# Altium footprint library TIA_LT1793.PcbLib: 8 footprints
Each footprint in its own frame and in the unit in brackets; x right, y up, seen from the top. Pads: shape width x height; smd on the part's side, far side on the other; paste and mask are expansions set on the pad; w line width, h text height; cw(c..) or ccw(c..) is an arc to the next point about the centre after c.
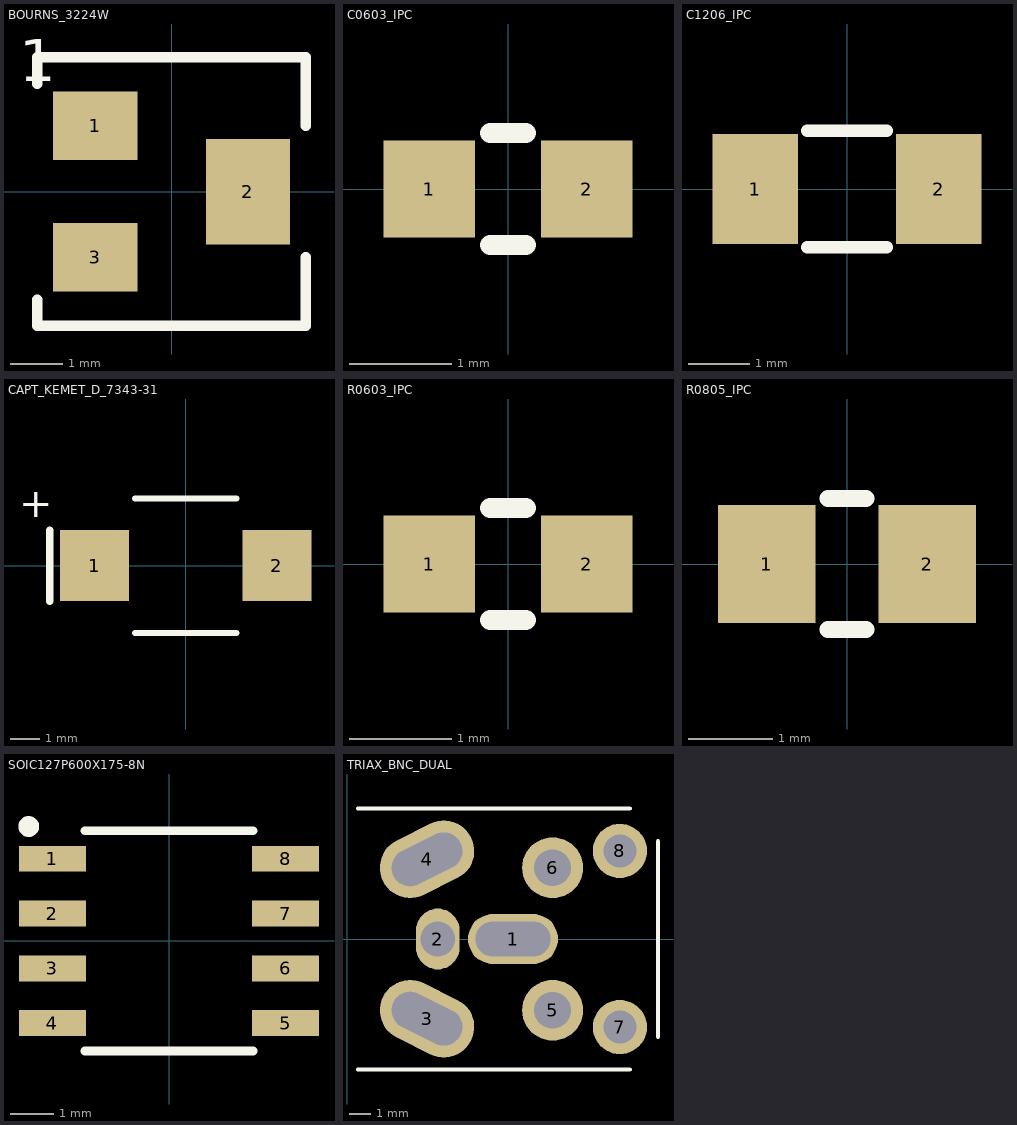
[diagram p0: the footprints below, top view; thin cyan lines are the x and y axes]

## BOURNS_3224W [mm] "Bourns 3224W trimmer 4 mm SMD top adjust. Pads 1/3 (extremos) 1.6x1.3 mm a x=-1.45, y=+-1.25; pad 2 (cursor) 1.6x2.0 mm a x=+1.45"
pads (3):
  rect 1.6x1.3 smd: 1(-1.45,1.25) 3(-1.45,-1.25)
  rect 1.6x2 smd: 2(1.45,0)
Layer0:
  lines w0.05: -2.8,-2.8 2.8,-2.8 2.8,2.8 -2.8,2.8 -2.8,-2.8
Top Overlay:
  lines w0.2: -2.55,-2.05 -2.55,-2.55 -0.45,-2.55 0.45,-2.55 2.55,-2.55 2.55,-1.25 ; -2.55,2.05 -2.55,2.55 -0.45,2.55 0.45,2.55 2.55,2.55 2.55,1.25
  text "1" at -2.9,2.1 h0.8

## C0603_IPC [mm] "Chip 0603 (1608 metric), IPC-7351B nominal: pads 0.90x0.95 mm a +-0.775 mm"
pads (2):
  rect 0.9x0.95 smd: 1(-0.775,0) 2(0.775,0)
Layer0:
  lines w0.05: -1.475,-0.725 1.475,-0.725 1.475,0.725 -1.475,0.725 -1.475,-0.725
Top Overlay:
  lines w0.2: -0.175,-0.55 0.175,-0.55 ; -0.175,0.55 0.175,0.55

## C1206_IPC [mm] "Chip 1206 (3216 metric), IPC-7351B nominal: pads 1.40x1.80 mm a +-1.50 mm"
pads (2):
  rect 1.4x1.8 smd: 1(-1.5,0) 2(1.5,0)
Layer0:
  lines w0.05: -2.45,-1.15 2.45,-1.15 2.45,1.15 -2.45,1.15 -2.45,-1.15
Top Overlay:
  lines w0.2: -0.65,-0.95 0.65,-0.95 ; -0.65,0.95 0.65,0.95

## CAPT_KEMET_D_7343-31 [mm] "KEMET T491 caso D (EIA 7343-31), Table 2 densidad B: pad L2.37 x W2.43 mm, hueco 3.87 mm. Pad 1 = anodo (+)"
pads (2):
  rect 2.37x2.43 smd: 1(-3.12,0) 2(3.12,0)
Layer0:
  lines w0.05: -4.56,-2.55 4.56,-2.55 4.56,2.55 -4.56,2.55 -4.56,-2.55
Top Overlay:
  lines w0.2: -1.735,-2.3 1.735,-2.3 ; -1.735,2.3 1.735,2.3
  lines w0.25: -4.655,-1.215 -4.655,1.215
  text "+" at -5.705,1.665 h1

## R0603_IPC [mm] "Chip 0603 (1608 metric), IPC-7351B nominal: pads 0.90x0.95 mm a +-0.775 mm"
pads (2):
  rect 0.9x0.95 smd: 1(-0.775,0) 2(0.775,0)
Layer0:
  lines w0.05: -1.475,-0.725 1.475,-0.725 1.475,0.725 -1.475,0.725 -1.475,-0.725
Top Overlay:
  lines w0.2: -0.175,-0.55 0.175,-0.55 ; -0.175,0.55 0.175,0.55

## R0805_IPC [mm] "Chip 0805 (2012 metric), IPC-7351B nominal: pads 1.15x1.40 mm a +-0.95 mm"
pads (2):
  rect 1.15x1.4 smd: 1(-0.95,0) 2(0.95,0)
Layer0:
  lines w0.05: -1.775,-0.95 1.775,-0.95 1.775,0.95 -1.775,0.95 -1.775,-0.95
Top Overlay:
  lines w0.2: -0.225,-0.775 0.225,-0.775 ; -0.225,0.775 0.225,0.775

## SOIC127P600X175-8N [mm] "SO-8 (LT1793CS8, ADI/LTC S8), pitch 1.27 mm, filas a +-2.70 mm, pads 1.55x0.60 mm (IPC-7351B nominal). Pin 1 arriba izquierda"
pads (8):
  rect 1.55x0.6 smd: 1(-2.7,1.905) 2(-2.7,0.635) 3(-2.7,-0.635) 4(-2.7,-1.905) 5(2.7,-1.905) 6(2.7,-0.635) 7(2.7,0.635) 8(2.7,1.905)
Top Overlay:
  circle w0.24: c-3.25,2.65 r0.12
  lines w0.2: -1.95,-2.55 1.95,-2.55 ; -1.95,2.55 1.95,2.55

## TRIAX_BNC_DUAL [mm] "Huella doble V3_DUAL: BNC acodado cntitle BNC-KWE-6 (C20415789) o triaxial Trompeter/Cinch CBBJR79. 1=vivo (ranura comun), 2=guard triax, 3-8=carcasa. Origen = borde de placa en el eje; el conector sale hacia -X"
pads (8):
  oval 4.14x2.3 hole 1.6 slot 3.44 at 0 deg: 1(7.63,0)
  oval 2x2.8 hole 1.6: 2(4.17,0)
  oval 4.532x2.8 hole 1.7 slot 3.432 at 153.48 deg rot 153.48: 3(3.675,-3.663)
  oval 4.532x2.8 hole 1.7 slot 3.432 at 26.52 deg rot 26.52: 4(3.675,3.663)
  round 2.8 hole 1.7: 5(9.453,-3.277) 6(9.453,3.277)
  round 2.5 hole 1.5: 7(12.55,-4.05) 8(12.55,4.05)
Top Overlay:
  lines w0.2: 0.5,-6 13,-6 ; 0.5,6 13,6 ; 14.3,-4.5 14.3,4.5